# Altium footprint library Propia.PcbLib: 378 footprints (part 8 of 24)
Each footprint in its own frame and in the unit in brackets; x right, y up, seen from the top. Pads: shape width x height; smd on the part's side, far side on the other; paste and mask are expansions set on the pad; w line width, h text height; cw(c..) or ccw(c..) is an arc to the next point about the centre after c.
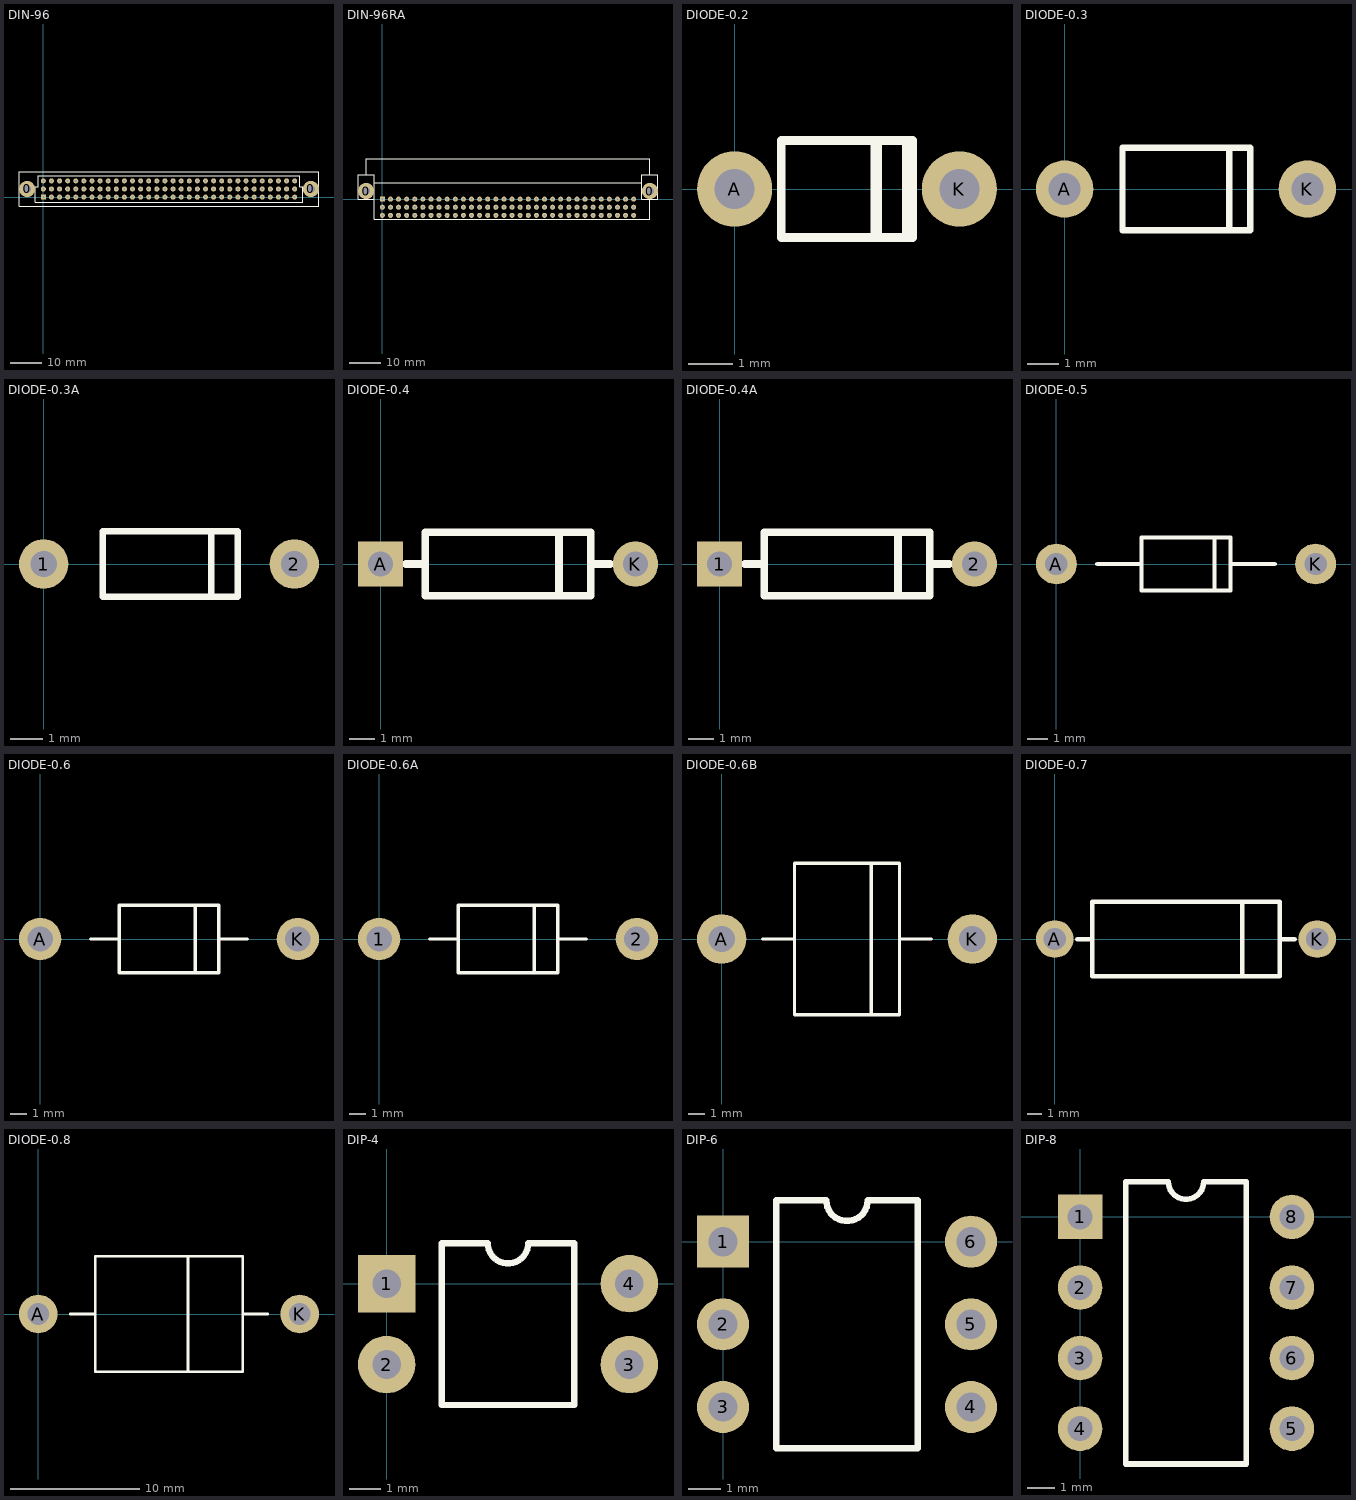
[diagram p7: the footprints below, top view; thin cyan lines are the x and y axes]

## DIN-96 [mil]
pads (98):
  round 200 hole 100: 0(-200,100) 0(3300,100)
  rect 62x62 hole 25: 1A(0,0)
  round 62 hole 25: 1B(0,100) 1C(0,200) 2A(100,0) 2B(100,100) 2C(100,200) 3A(200,0) 3B(200,100) 3C(200,200) 4A(300,0) 4B(300,100) 4C(300,200) 5A(400,0) 5B(400,100) 5C(400,200) 6A(500,0) 6B(500,100) 6C(500,200) 7A(600,0) 7B(600,100) 7C(600,200) 8A(700,0) 8B(700,100) 8C(700,200) 9A(800,0) 9B(800,100) 9C(800,200) 10A(900,0) 10B(900,100) 10C(900,200) 11A(1000,0) 11B(1000,100) 11C(1000,200) 12A(1100,0) 12B(1100,100) 12C(1100,200) 13A(1200,0) 13B(1200,100) 13C(1200,200) 14A(1300,0) 14B(1300,100) 14C(1300,200) 15A(1400,0) 15B(1400,100) 15C(1400,200) 16A(1500,0) 16B(1500,100) 16C(1500,200) 17A(1600,0) 17B(1600,100) 17C(1600,200) 18A(1700,0) 18B(1700,100) 18C(1700,200) 19A(1800,0) 19B(1800,100) 19C(1800,200) 20A(1900,0) 20B(1900,100) 20C(1900,200) 21A(2000,0) 21B(2000,100) 21C(2000,200) 22A(2100,0) 22B(2100,100) 22C(2100,200) 23A(2200,0) 23B(2200,100) 23C(2200,200) 24A(2300,0) 24B(2300,100) 24C(2300,200) 25A(2400,0) 25B(2400,100) 25C(2400,200) 26A(2500,0) 26B(2500,100) 26C(2500,200) 27A(2600,0) 27B(2600,100) 27C(2600,200) 28A(2700,0) 28B(2700,100) 28C(2700,200) 29A(2800,0) 29B(2800,100) 29C(2800,200) 30A(2900,0) 30B(2900,100) 30C(2900,200) 31A(3000,0) 31B(3000,100) 31C(3000,200) 32A(3100,0) 32B(3100,100) 32C(3100,200)
TopOverlay:
  lines w10: -300,-110 3400,-110 3400,310 -300,310 -300,-110 ; -100,-65 3200,-65 3200,130 3165,130 3165,265 -65,265 -65,130 -100,130 -100,-65

## DIN-96RA [mil]
pads (98):
  round 200 hole 100: 0(-200,100) 0(3300,100)
  rect 62x62 hole 25: 1A(0,0)
  round 62 hole 25: 1B(0,-100) 1C(0,-200) 2A(100,0) 2B(100,-100) 2C(100,-200) 3A(200,0) 3B(200,-100) 3C(200,-200) 4A(300,0) 4B(300,-100) 4C(300,-200) 5A(400,0) 5B(400,-100) 5C(400,-200) 6A(500,0) 6B(500,-100) 6C(500,-200) 7A(600,0) 7B(600,-100) 7C(600,-200) 8A(700,0) 8B(700,-100) 8C(700,-200) 9A(800,0) 9B(800,-100) 9C(800,-200) 10A(900,0) 10B(900,-100) 10C(900,-200) 11A(1000,0) 11B(1000,-100) 11C(1000,-200) 12A(1100,0) 12B(1100,-100) 12C(1100,-200) 13A(1200,0) 13B(1200,-100) 13C(1200,-200) 14A(1300,0) 14B(1300,-100) 14C(1300,-200) 15A(1400,0) 15B(1400,-100) 15C(1400,-200) 16A(1500,0) 16B(1500,-100) 16C(1500,-200) 17A(1600,0) 17B(1600,-100) 17C(1600,-200) 18A(1700,0) 18B(1700,-100) 18C(1700,-200) 19A(1800,0) 19B(1800,-100) 19C(1800,-200) 20A(1900,0) 20B(1900,-100) 20C(1900,-200) 21A(2000,0) 21B(2000,-100) 21C(2000,-200) 22A(2100,0) 22B(2100,-100) 22C(2100,-200) 23A(2200,0) 23B(2200,-100) 23C(2200,-200) 24A(2300,0) 24B(2300,-100) 24C(2300,-200) 25A(2400,0) 25B(2400,-100) 25C(2400,-200) 26A(2500,0) 26B(2500,-100) 26C(2500,-200) 27A(2600,0) 27B(2600,-100) 27C(2600,-200) 28A(2700,0) 28B(2700,-100) 28C(2700,-200) 29A(2800,0) 29B(2800,-100) 29C(2800,-200) 30A(2900,0) 30B(2900,-100) 30C(2900,-200) 31A(3000,0) 31B(3000,-100) 31C(3000,-200) 32A(3100,0) 32B(3100,-100) 32C(3100,-200)
TopOverlay:
  lines w10: -100,200 3200,200 ; 3300,0 3300,-250 -100,-250 -100,0 ; -200,300 -100,300 -100,0 ; -200,300 -300,300 -300,0 -100,0 ; -200,300 -200,500 3300,500 3300,300 ; 3300,300 3400,300 3400,0 3200,0 3200,300 3300,300

## DIODE-0.2 [mm]
pads (2):
  round 1.7 hole 0.9: A(0,0) K(5.08,0)
TopOverlay:
  lines w0.2: 3.882,-1.1 3.882,1.1 ; 1.055,-1.1 4.025,-1.1 4.025,0 4.025,1.1 1.055,1.1 1.055,-1.1
  lines w0.254: 3.2,-1 3.2,1.04

## DIODE-0.3 [mm]
pads (2):
  round 1.8 hole 1: A(0,0) K(7.62,0)
TopOverlay:
  lines w0.2: 5.168,-1.3 5.168,1.3 ; 1.815,-1.3 1.815,1.3 5.83,1.3 5.825,0 5.825,-1.3 1.815,-1.3

## DIODE-0.3A [mm]
pads (2):
  round 1.5 hole 0.8: 1(0,0) 2(7.62,0)
TopOverlay:
  lines w0.2: 1.79,-1 5.9,-1 5.9,-0.1 5.9,1 1.8,1 1.8,-1 ; 5.1,-1 5.1,1

## DIODE-0.4 [mm]
pads (2):
  rect 1.8x1.8 hole 1: A(0,0)
  round 1.8 hole 1: K(10.16,0)
TopOverlay:
  lines w0.305: 1.016,0 1.778,0 ; 7.112,-1.27 7.112,1.27 ; 8.382,0 9.144,0 ; 1.778,-1.27 8.382,-1.27 8.382,1.27 1.778,1.27 1.778,-1.27

## DIODE-0.4A [mm]
pads (2):
  rect 1.8x1.8 hole 1: 1(0,0)
  round 1.8 hole 1: 2(10.16,0)
TopOverlay:
  lines w0.305: 1.016,0 1.778,0 ; 7.112,-1.27 7.112,1.27 ; 8.382,0 9.144,0 ; 1.778,-1.27 1.778,1.27 8.382,1.27 8.382,-1.27 1.778,-1.27

## DIODE-0.5 [mm]
pads (2):
  round 2 hole 1.1: A(0,0) K(12.7,0)
TopOverlay:
  lines w0.2: 2,0 4.175,0 ; 7.742,-1.3 7.742,1.3 ; 8.525,0 10.7,0 ; 4.175,0 4.175,-1.3 8.525,-1.3 8.525,1.3 4.175,1.3 4.175,0

## DIODE-0.6 [mm]
pads (2):
  round 2.5 hole 1.5: A(0,0) K(15.24,0)
TopOverlay:
  lines w0.2: 3,0 4.675,0 ; 9.178,-2 9.178,2 ; 10.565,0 12.24,0 ; 4.675,0 4.675,2 10.565,2 10.565,-2 4.675,-2 4.675,0

## DIODE-0.6A [mm]
pads (2):
  round 2.5 hole 1.5: 1(0,0) 2(15.24,0)
TopOverlay:
  lines w0.2: 3,0 4.675,0 ; 9.178,-2 9.178,2 ; 10.565,0 12.24,0 ; 4.675,0 4.675,2 10.565,2 10.565,-2 4.675,-2 4.675,0

## DIODE-0.6B [mm]
pads (2):
  round 3 hole 1.6: A(0,0) K(15.24,0)
TopOverlay:
  lines w0.2: 2.5,0 4.425,0 ; 9.095,-4.6 9.095,4.6 ; 10.815,0 12.74,0 ; 4.425,0 4.425,4.6 10.815,4.6 10.815,-4.6 4.425,-4.6 4.425,0

## DIODE-0.7 [mm]
pads (2):
  round 2.54 hole 1.5: A(0,0) K(17.78,0)
TopOverlay:
  lines w0.305: 1.524,0 2.54,0 ; 12.7,-2.54 12.7,2.54 ; 15.24,0 16.256,0 ; 2.54,-2.54 15.24,-2.54 15.24,2.54 2.54,2.54 2.54,-2.54

## DIODE-0.8 [mm]
pads (2):
  round 3 hole 1.7: A(0,0) K(20.32,0)
TopOverlay:
  lines w0.2: 2.5,0 4.425,0 ; 11.635,-4.5 11.635,4.5 ; 15.895,0 17.82,0 ; 4.425,0 4.425,-4.5 15.895,-4.5 15.895,4.5 4.425,4.5 4.425,0

## DIP-4 [mm]
pads (4):
  rect 1.8x1.8 hole 0.9: 1(0,0)
  round 1.8 hole 0.9: 2(0,-2.54) 3(7.62,-2.54) 4(7.62,0)
TopOverlay:
  lines w0.2: 1.735,-3.81 1.735,1.27 3.175,1.27 ccw(c3.81,1.27) 4.445,1.27 5.885,1.27 5.885,-3.81 1.735,-3.81

## DIP-6 [mm]
pads (6):
  rect 1.6x1.6 hole 0.9: 1(0,0)
  round 1.6 hole 0.9: 2(0,-2.54) 3(0,-5.08) 4(7.62,-5.08) 5(7.62,-2.54) 6(7.62,0)
TopOverlay:
  lines w0.2: 1.635,-6.35 1.635,1.27 3.175,1.27 ccw(c3.81,1.27) 4.445,1.27 5.985,1.27 5.985,-6.35 1.635,-6.35

## DIP-8 [mm]
pads (8):
  rect 1.6x1.6 hole 0.9: 1(0,0)
  round 1.6 hole 0.9: 2(0,-2.54) 3(0,-5.08) 4(0,-7.62) 5(7.62,-7.62) 6(7.62,-5.08) 7(7.62,-2.54) 8(7.62,0)
TopOverlay:
  lines w0.2: 1.635,-8.89 1.635,1.27 3.175,1.27 ccw(c3.81,1.27) 4.445,1.27 5.985,1.27 5.985,-8.89 1.635,-8.89